# Altium footprint library KartaRfLibs.PcbLib: 51 footprints (part 3 of 4)
Each footprint in its own frame and in the unit in brackets; x right, y up, seen from the top. Pads: shape width x height; smd on the part's side, far side on the other; paste and mask are expansions set on the pad; w line width, h text height; cw(c..) or ccw(c..) is an arc to the next point about the centre after c.
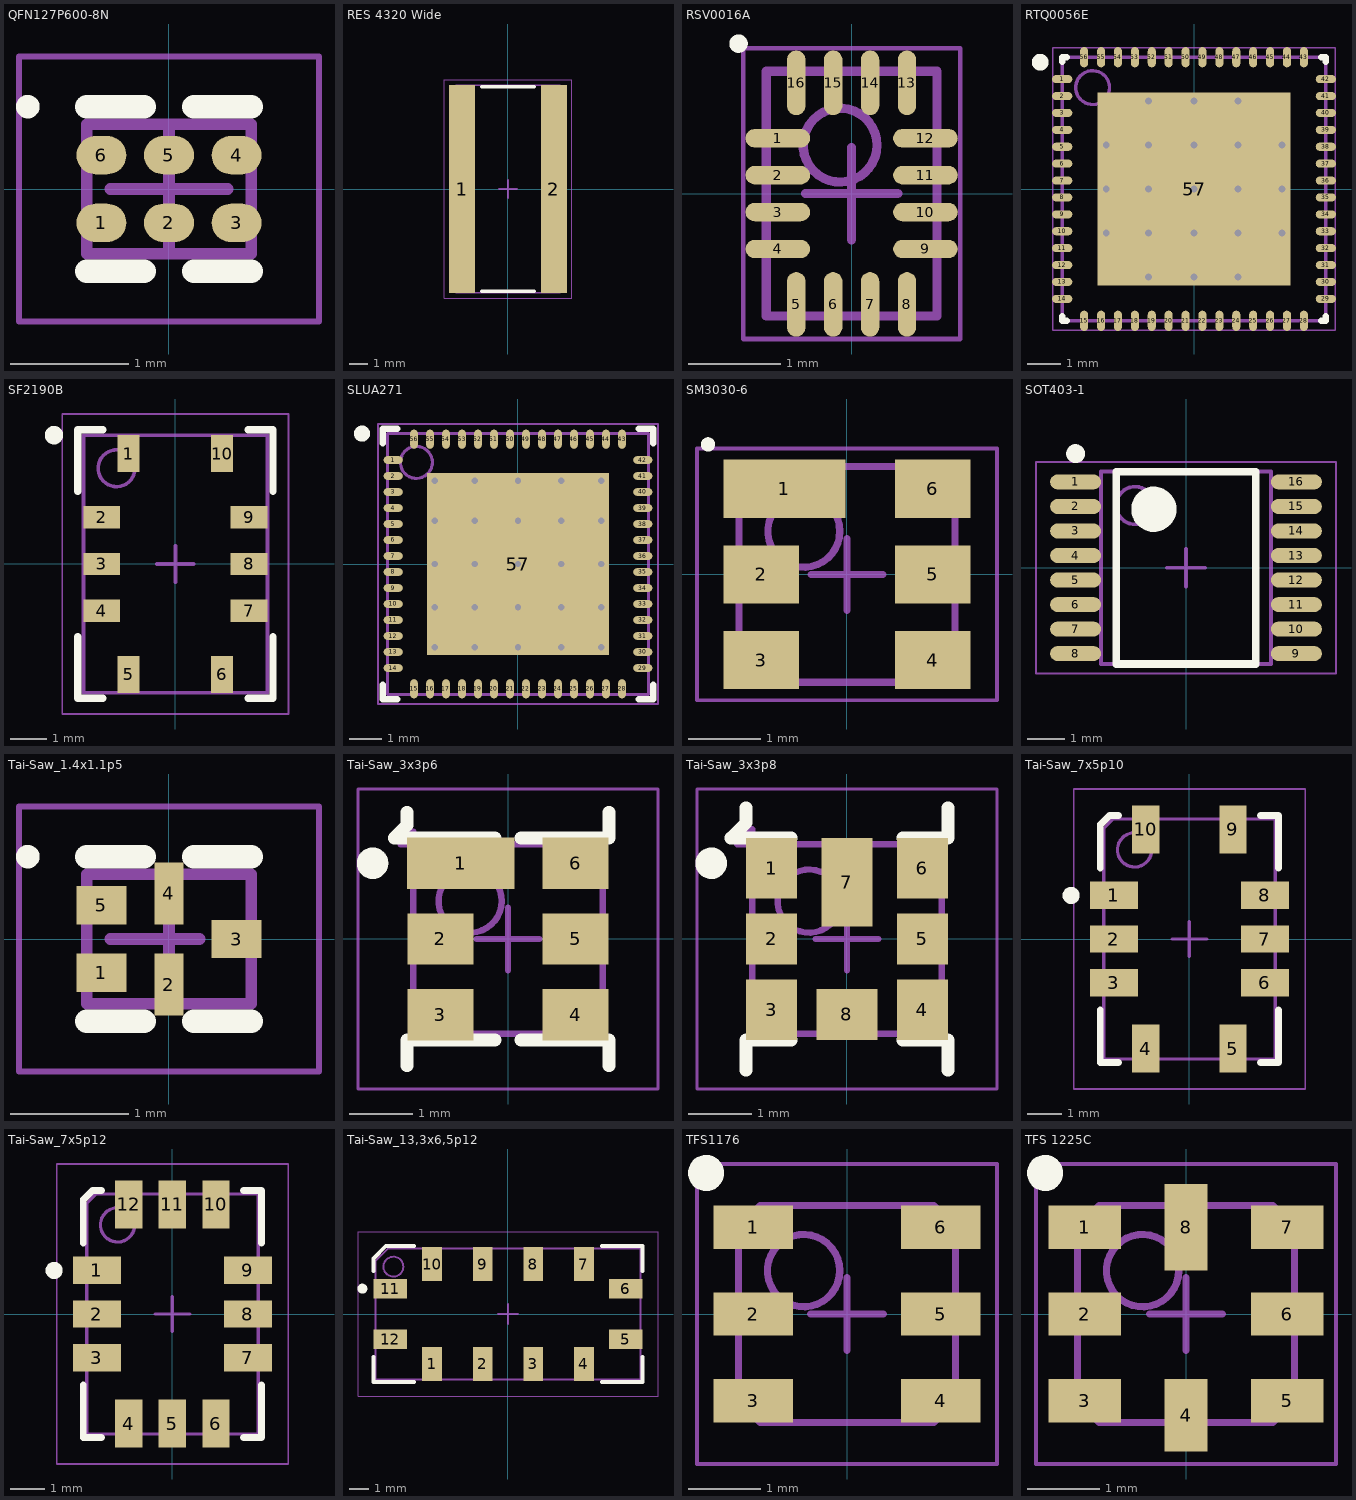
[diagram p2: the footprints below, top view; thin cyan lines are the x and y axes]

## QFN127P600-8N [mm]
height 0.7
pads (6):
  oval 0.425x0.325 smd: 1(-0.575,-0.288) 2(0,-0.288) 3(0.575,-0.288) 4(0.575,0.288) 5(0,0.288) 6(-0.575,0.288)
Top Overlay:
  circle w0.1: c-1.2,0.7 r0.05
  lines w0.2: -0.7,-0.7 -0.212,-0.7 ; -0.7,0.7 -0.212,0.7 ; 0.213,-0.7 0.7,-0.7 ; 0.213,0.7 0.7,0.7
Mechanical 13:
  lines w0.1: -0.7,-0.55 0.7,-0.55 0.7,0.55 -0.7,0.55 -0.7,-0.55
Mechanical 15:
  lines w0.05: -1.275,-1.125 1.275,-1.125 1.275,1.125 -1.275,1.125 -1.275,-1.125
  lines w0.1: -0.5,0 0.5,0 ; 0,-0.5 0,0.5
3D body: height 0.7, standoff 0.01, extent -0.7,-0.55 0.7,0.55

## RES 4320 Wide [mm] "FCSL110, Chip Resistor, 2-Leads, Body 5,60x11,20mm, IPC Medium Density"
height 0.6
pads (2):
  rect 1.4x11.25 smd: 1(-2.475,0) 2(2.475,0)
Top Overlay:
  lines w0.2: -1.4,-5.525 1.4,-5.525 ; -1.4,5.525 1.4,5.525
Mechanical 13:
  lines w0.1: -2.8,-5.6 -2.8,5.6 2.8,5.6 2.8,-5.6 -2.8,-5.6
Mechanical 15:
  lines w0.05: -3.45,-5.9 -3.45,5.9 3.45,5.9 3.45,-5.9 -3.45,-5.9
  lines w0.1: -0.5,0 0.5,0 ; 0,-0.5 0,0.5
3D body "RES 4320 Wide.step": height 0.6, standoff 0, extent -2.8,-5.6 2.8,5.6

## RSV0016A [mm] "TXB0304RSVR, UQFN, 16-Leads, Body 1,80x2,60mm, Pitch 0,40mm, IPC Medium Density"
height 0.55
pads (16):
  oval 0.7x0.2 smd: 1(-0.8,0.6) 2(-0.8,0.2) 3(-0.8,-0.2) 4(-0.8,-0.6) 9(0.8,-0.6) 10(0.8,-0.2) 11(0.8,0.2) 12(0.8,0.6)
  oval 0.2x0.7 smd: 5(-0.6,-1.2) 6(-0.2,-1.2) 7(0.2,-1.2) 8(0.6,-1.2) 13(0.6,1.2) 14(0.2,1.2) 15(-0.2,1.2) 16(-0.6,1.2)
Top Overlay:
  circle w0.1: c-1.225,1.625 r0.05
Mechanical 13:
  circle w0.1: c-0.125,0.525 r0.4
  lines w0.1: -0.925,-1.325 0.925,-1.325 0.925,1.325 -0.925,1.325 -0.925,-1.325
Mechanical 15:
  lines w0.05: -1.175,-1.575 1.175,-1.575 1.175,1.575 -1.175,1.575 -1.175,-1.575
  lines w0.1: -0.5,0 0.5,0 ; 0,-0.5 0,0.5
3D body "RSV0016A .step": height 0.55, standoff 0, extent -0.925,-1.325 0.925,1.325

## RTQ0056E [mm] "LMK04610, 56-Leads, Body 7,80x7,80mm, Pitch 0,50mm, Thermal Pad 5,70x5,70mm, IPC Medium Density"
height 1
pads (57):
  oval 0.6x0.24 smd: 1(-3.9,3.25) 2(-3.9,2.75) 3(-3.9,2.25) 4(-3.9,1.75) 5(-3.9,1.25) 6(-3.9,0.75) 7(-3.9,0.25) 8(-3.9,-0.25) 9(-3.9,-0.75) 10(-3.9,-1.25) 11(-3.9,-1.75) 12(-3.9,-2.25) 13(-3.9,-2.75) 14(-3.9,-3.25) 29(3.9,-3.25) 30(3.9,-2.75) 31(3.9,-2.25) 32(3.9,-1.75) 33(3.9,-1.25) 34(3.9,-0.75) 35(3.9,-0.25) 36(3.9,0.25) 37(3.9,0.75) 38(3.9,1.25) 39(3.9,1.75) 40(3.9,2.25) 41(3.9,2.75) 42(3.9,3.25)
  oval 0.24x0.6 smd: 15(-3.25,-3.9) 16(-2.75,-3.9) 17(-2.25,-3.9) 18(-1.75,-3.9) 19(-1.25,-3.9) 20(-0.75,-3.9) 21(-0.25,-3.9) 22(0.25,-3.9) 23(0.75,-3.9) 24(1.25,-3.9) 25(1.75,-3.9) 26(2.25,-3.9) 27(2.75,-3.9) 28(3.25,-3.9) 43(3.25,3.9) 44(2.75,3.9) 45(2.25,3.9) 46(1.75,3.9) 47(1.25,3.9) 48(0.75,3.9) 49(0.25,3.9) 50(-0.25,3.9) 51(-0.75,3.9) 52(-1.25,3.9) 53(-1.75,3.9) 54(-2.25,3.9) 55(-2.75,3.9) 56(-3.25,3.9)
  rect 5.7x5.7 smd: 57(0,0)
via 1.3,-2.6 diameter 0.5 hole 0.2
via 0,-2.6 diameter 0.5 hole 0.2
via -1.35,-2.6 diameter 0.5 hole 0.2
via 2.6,-1.3 diameter 0.5 hole 0.2
via 1.3,-1.3 diameter 0.5 hole 0.2
via 0,-1.3 diameter 0.5 hole 0.2
via -1.35,-1.3 diameter 0.5 hole 0.2
via -2.6,-1.3 diameter 0.5 hole 0.2
via 2.6,0 diameter 0.5 hole 0.2
via 1.3,0 diameter 0.5 hole 0.2
via 0,0 diameter 0.5 hole 0.2
via -1.35,0 diameter 0.5 hole 0.2
via -2.6,0 diameter 0.5 hole 0.2
via 2.6,1.3 diameter 0.5 hole 0.2
via 1.3,1.3 diameter 0.5 hole 0.2
via 0,1.3 diameter 0.5 hole 0.2
via -1.35,1.3 diameter 0.5 hole 0.2
via -2.6,1.3 diameter 0.5 hole 0.2
via 1.3,2.6 diameter 0.5 hole 0.2
via 0,2.6 diameter 0.5 hole 0.2
via -1.35,2.6 diameter 0.5 hole 0.2
Top Overlay:
  circle w0.25: c-4.55,3.75 r0.125
  lines w0.2: -3.9,-3.77 -3.9,-3.9 -3.77,-3.9 ; -3.9,3.77 -3.9,3.9 -3.77,3.9 ; 3.77,-3.9 3.9,-3.9 3.9,-3.77 ; 3.77,3.9 3.9,3.9 3.9,3.77
Mechanical 13:
  circle w0.1: c-3,3 r0.5
  lines w0.1: -3.9,-3.9 3.9,-3.9 3.9,3.9 -3.9,3.9 -3.9,-3.9
Mechanical 15:
  lines w0.05: -4.175,-4.175 4.175,-4.175 4.175,4.175 -4.175,4.175 -4.175,-4.175
  lines w0.1: -0.5,0 0.5,0 ; 0,-0.5 0,0.5
3D body "RTQ0056E.step": height 1, standoff 0, extent -3.9,-3.9 3.9,3.9

## SF2190B [mm] "SF2190B, 10-Leads, Body 5,00x7,00mm, Pitch 2,54mm/1,27mm, IPC Medium Density"
height 1.65
pads (10):
  rect 0.6x1 smd: 1(-1.27,3) 5(-1.27,-3) 6(1.27,-3) 10(1.27,3)
  rect 1x0.6 smd: 2(-2,1.27) 3(-2,0) 4(-2,-1.27) 7(2,-1.27) 8(2,0) 9(2,1.27)
Top Overlay:
  circle w0.25: c-3.3,3.5 r0.125
  lines w0.2: -2.65,-1.97 -2.65,-3.65 -1.97,-3.65 ; -2.65,1.97 -2.65,3.65 -1.97,3.65 ; 1.97,-3.65 2.65,-3.65 2.65,-1.97 ; 1.97,3.65 2.65,3.65 2.65,1.97
Mechanical 13:
  circle w0.1: c-1.6,2.6 r0.5
  lines w0.1: -2.5,-3.5 2.5,-3.5 2.5,3.5 -2.5,3.5 -2.5,-3.5
Mechanical 15:
  lines w0.05: -3.075,-4.075 3.075,-4.075 3.075,4.075 -3.075,4.075 -3.075,-4.075
  lines w0.1: -0.5,0 0.5,0 ; 0,-0.5 0,0.5
3D body "SF2190B.step": height 1.65, standoff 0, extent -2.52,-3.52 2.52,3.52

## SLUA271 [mm] "SLUA271, VQFN, 56-Leads, Body 8,00x8,00mm, Pitch 0,50mm, Thermal Pad 5,70x5,70mm, IPC High Density"
height 1
pads (57):
  oval 0.6x0.24 smd: 1(-3.9,3.25) 2(-3.9,2.75) 3(-3.9,2.25) 4(-3.9,1.75) 5(-3.9,1.25) 6(-3.9,0.75) 7(-3.9,0.25) 8(-3.9,-0.25) 9(-3.9,-0.75) 10(-3.9,-1.25) 11(-3.9,-1.75) 12(-3.9,-2.25) 13(-3.9,-2.75) 14(-3.9,-3.25) 29(3.9,-3.25) 30(3.9,-2.75) 31(3.9,-2.25) 32(3.9,-1.75) 33(3.9,-1.25) 34(3.9,-0.75) 35(3.9,-0.25) 36(3.9,0.25) 37(3.9,0.75) 38(3.9,1.25) 39(3.9,1.75) 40(3.9,2.25) 41(3.9,2.75) 42(3.9,3.25)
  oval 0.24x0.6 smd: 15(-3.25,-3.9) 16(-2.75,-3.9) 17(-2.25,-3.9) 18(-1.75,-3.9) 19(-1.25,-3.9) 20(-0.75,-3.9) 21(-0.25,-3.9) 22(0.25,-3.9) 23(0.75,-3.9) 24(1.25,-3.9) 25(1.75,-3.9) 26(2.25,-3.9) 27(2.75,-3.9) 28(3.25,-3.9) 43(3.25,3.9) 44(2.75,3.9) 45(2.25,3.9) 46(1.75,3.9) 47(1.25,3.9) 48(0.75,3.9) 49(0.25,3.9) 50(-0.25,3.9) 51(-0.75,3.9) 52(-1.25,3.9) 53(-1.75,3.9) 54(-2.25,3.9) 55(-2.75,3.9) 56(-3.25,3.9)
  rect 5.7x5.7 smd: 57(0,0)
via 2.6,-2.6 diameter 0.5 hole 0.2
via 1.35,-2.6 diameter 0.5 hole 0.2
via 0,-2.6 diameter 0.5 hole 0.2
via -1.35,-2.6 diameter 0.5 hole 0.2
via -2.6,-2.6 diameter 0.5 hole 0.2
via 2.6,-1.35 diameter 0.5 hole 0.2
via 1.35,-1.35 diameter 0.5 hole 0.2
via 0,-1.35 diameter 0.5 hole 0.2
via -1.35,-1.35 diameter 0.5 hole 0.2
via -2.6,-1.35 diameter 0.5 hole 0.2
via 2.6,0 diameter 0.5 hole 0.2
via 1.35,0 diameter 0.5 hole 0.2
via 0,0 diameter 0.5 hole 0.2
via -1.35,0 diameter 0.5 hole 0.2
via -2.6,0 diameter 0.5 hole 0.2
via 2.6,1.35 diameter 0.5 hole 0.2
via 1.35,1.35 diameter 0.5 hole 0.2
via 0,1.35 diameter 0.5 hole 0.2
via -1.35,1.35 diameter 0.5 hole 0.2
via -2.6,1.35 diameter 0.5 hole 0.2
via 2.6,2.6 diameter 0.5 hole 0.2
via 1.35,2.6 diameter 0.5 hole 0.2
via 0,2.6 diameter 0.5 hole 0.2
via -1.35,2.6 diameter 0.5 hole 0.2
via -2.6,2.6 diameter 0.5 hole 0.2
Top Overlay:
  circle w0.25: c-4.875,4.075 r0.125
  lines w0.2: -4.225,-3.77 -4.225,-4.225 -3.77,-4.225 ; -4.225,3.77 -4.225,4.225 -3.77,4.225 ; 3.77,-4.225 4.225,-4.225 4.225,-3.77 ; 3.77,4.225 4.225,4.225 4.225,3.77
Mechanical 13:
  circle w0.1: c-3.175,3.175 r0.5
  lines w0.1: -4.075,-4.075 4.075,-4.075 4.075,4.075 -4.075,4.075 -4.075,-4.075
Mechanical 15:
  lines w0.05: -4.375,-4.375 4.375,-4.375 4.375,4.375 -4.375,4.375 -4.375,-4.375
  lines w0.1: -0.5,0 0.5,0 ; 0,-0.5 0,0.5
3D body "SLUA271.step": height 1, standoff 0, extent -4.095,-4.095 4.095,4.095

## SM3030-6 [mm] "SM3030-6, SAW Filter, 6-Leads, Body 3,00x3,00mm, Pitch 1,19mm, IPC Medium Density"
height 1.25
pads (6):
  rect 1.7x0.81 smd: 1(-0.87,1.19)
  rect 1.05x0.81 smd: 2(-1.195,0) 3(-1.195,-1.19) 4(1.195,-1.19) 5(1.195,0) 6(1.195,1.19)
Top Overlay:
  circle w0.1: c-1.932,1.807 r0.05
Mechanical 13:
  circle w0.1: c-0.6,0.6 r0.5
  lines w0.1: -1.5,-1.5 1.5,-1.5 1.5,1.5 -1.5,1.5 -1.5,-1.5
Mechanical 15:
  lines w0.05: -2.085,-1.75 2.085,-1.75 2.085,1.75 -2.085,1.75 -2.085,-1.75
  lines w0.1: -0.5,0 0.5,0 ; 0,-0.5 0,0.5
3D body "SM3030-6.step": height 1.25, standoff 0.1, extent -1.5,-1.5 1.5,1.5

## SOT403-1 [mm] "SC18IS602B, TSSOP16, 16-Leads, Body 5,00x4,40mm, Pitch 0,65mm, IPC Medium Density"
height 1.1
pads (16):
  oval 1.35x0.4 smd: 1(-2.925,2.275) 2(-2.925,1.625) 3(-2.925,0.975) 4(-2.925,0.325) 5(-2.925,-0.325) 6(-2.925,-0.975) 7(-2.925,-1.625) 8(-2.925,-2.275) 9(2.925,-2.275) 10(2.925,-1.625) 11(2.925,-0.975) 12(2.925,-0.325) 13(2.925,0.325) 14(2.925,0.975) 15(2.925,1.625) 16(2.925,2.275)
Top Overlay:
  circle w0.6: c-0.85,1.55 r0.3
  circle w0.25: c-2.925,3.025 r0.125
  lines w0.2: -1.85,-2.55 1.85,-2.55 1.85,2.55 -1.85,2.55 -1.85,-2.55
Mechanical 13:
  circle w0.1: c-1.35,1.65 r0.5
  lines w0.1: -2.25,-2.55 2.25,-2.55 2.25,2.55 -2.25,2.55 -2.25,-2.55
Mechanical 15:
  lines w0.05: -3.975,-2.8 3.975,-2.8 3.975,2.8 -3.975,2.8 -3.975,-2.8
  lines w0.1: -0.5,0 0.5,0 ; 0,-0.5 0,0.5
3D body "SOT403-1.step": height 1.1, standoff 0, extent -3.3,-2.55 3.3,2.55

## Tai-Saw_1.4x1.1p5 [mm] "TA2298A, 6-Leads, Body 1,40x1,10mm, Pitch 0,57mm/0,50mm, IPC Medium Density"
height 0.7
pads (5):
  rect 0.425x0.325 smd: 1(-0.575,-0.288) 3(0.575,0) 5(-0.575,0.288)
  rect 0.25x0.525 smd: 2(0,-0.387) 4(0,0.387)
Top Overlay:
  circle w0.1: c-1.2,0.7 r0.05
  lines w0.2: -0.7,-0.7 -0.212,-0.7 ; -0.7,0.7 -0.212,0.7 ; 0.213,-0.7 0.7,-0.7 ; 0.213,0.7 0.7,0.7
Mechanical 13:
  lines w0.1: -0.7,-0.55 -0.7,0.55 0.7,0.55 0.7,-0.55 -0.7,-0.55
Mechanical 15:
  lines w0.05: -1.275,-1.125 -1.275,1.125 1.275,1.125 1.275,-1.125 -1.275,-1.125
  lines w0.1: -0.5,0 0.26,0 ; 0,-0.5 0,0.5
3D body "Tai-Saw_1.4x1.1p5.step": height 0.7, standoff 0, extent -0.7,-0.56 0.7,0.56

## Tai-Saw_3x3p6 [mm] "TA1251B, 6-Pins, Body 3,00x3,00mmx1,40mm, Pitch 1,20mm, IPC Medium Density"
height 1.4
pads (6):
  rect 1.7x0.81 smd: 1(-0.75,1.2)
  rect 1.05x0.81 smd: 2(-1.07,0) 3(-1.07,-1.2) 4(1.07,-1.2) 5(1.07,0) 6(1.07,1.2)
Top Overlay:
  circle w0.25: c-2.145,1.2 r0.125
  lines w0.2: -1.6,-2.005 -1.6,-1.6 -0.205,-1.6 ; -1.6,2.005 -1.6,1.802 -1.803,1.6 -0.205,1.6 ; 0.205,-1.6 1.6,-1.6 1.6,-2.005 ; 0.205,1.6 1.6,1.6 1.6,2.005
Mechanical 13:
  circle w0.1: c-0.6,0.6 r0.5
  lines w0.1: -1.703,1.5 1.5,1.5 1.5,-1.5 -1.5,-1.5 -1.5,1.702 -1.703,1.5
Mechanical 15:
  lines w0.05: -2.375,-2.375 -2.375,2.375 2.375,2.375 2.375,-2.375 -2.375,-2.375
  lines w0.1: -0.5,0 0.5,0 ; 0,-0.5 0,0.5
3D body "Tai-Saw_3x3p6.step": height 1.4, standoff 0, extent -1.5,-1.5 1.5,1.5

## Tai-Saw_3x3p8 [mm] "TA0726A, 8-Pins, Body 3,00x3,00mmx1,40mm, Pitch 1,20mm, IPC Medium Density"
height 1.4
pads (8):
  rect 0.81x0.96 smd: 1(-1.195,1.12) 3(-1.195,-1.12) 4(1.195,-1.12) 6(1.195,1.12)
  rect 0.81x0.81 smd: 2(-1.195,0) 5(1.195,0)
  rect 0.81x1.4 smd: 7(0,0.9)
  rect 0.96x0.81 smd: 8(0,-1.195)
Top Overlay:
  circle w0.25: c-2.15,1.2 r0.125
  lines w0.2: -1.6,-2.08 -1.6,-1.6 -0.88,-1.6 ; -1.6,2.08 -1.6,1.84 -1.84,1.6 -0.88,1.6 ; 0.88,-1.6 1.6,-1.6 1.6,-2.08 ; 0.88,1.6 1.6,1.6 1.6,2.08
Mechanical 13:
  circle w0.1: c-0.6,0.6 r0.5
  lines w0.1: -1.74,1.5 -1.5,1.74 -1.5,-1.5 1.5,-1.5 1.5,1.5 -1.74,1.5
Mechanical 15:
  lines w0.05: -2.375,-2.375 2.375,-2.375 2.375,2.375 -2.375,2.375 -2.375,-2.375
  lines w0.1: -0.5,0 0.5,0 ; 0,-0.5 0,0.5
3D body "Tai-Saw_3x3.step": height 1.4, standoff 0, extent -1.5,-1.605 1.5,1.5

## Tai-Saw_7x5p10 [mm] "TA0409A, 10-Pins, Body 5,00x7,00mmx1,70mm, Pitch 1,27mm, IPC Medium Density"
height 1.7
pads (10):
  rect 1.4x0.8 smd: 1(-2.2,1.27) 2(-2.2,0) 3(-2.2,-1.27) 6(2.2,-1.27) 7(2.2,0) 8(2.2,1.27)
  rect 0.8x1.4 smd: 4(-1.27,-3.2) 5(1.27,-3.2) 9(1.27,3.2) 10(-1.27,3.2)
Top Overlay:
  circle w0.25: c-3.45,1.27 r0.125
  lines w0.2: -2.6,-2.07 -2.6,-3.6 -2.07,-3.6 ; -2.6,2.07 -2.6,3.335 -2.335,3.6 -2.07,3.6 ; 2.07,-3.6 2.6,-3.6 2.6,-2.07 ; 2.07,3.6 2.6,3.6 2.6,2.07
Mechanical 13:
  circle w0.1: c-1.6,2.6 r0.5
  lines w0.1: -2.5,-3.5 -2.5,3.235 -2.235,3.5 2.5,3.5 2.5,-3.5 -2.5,-3.5
Mechanical 15:
  lines w0.05: -3.375,-4.375 -3.375,4.375 3.375,4.375 3.375,-4.375 -3.375,-4.375
  lines w0.1: -0.5,0 0.5,0 ; 0,-0.5 0,0.5
3D body "Tai-Saw_7x5.step": height 1.7, standoff 0, extent -2.5,-3.5 2.5,3.5

## Tai-Saw_7x5p12 [mm] "TA0409A, 12-Pins, Body 5,00x7,00mmx1,70mm, Pitch 1,27mm, IPC Medium Density"
height 1.7
pads (12):
  rect 1.4x0.8 smd: 1(-2.2,1.27) 2(-2.2,0) 3(-2.2,-1.27) 7(2.2,-1.27) 8(2.2,0) 9(2.2,1.27)
  rect 0.8x1.4 smd: 4(-1.27,-3.2) 5(0,-3.2) 6(1.27,-3.2) 10(1.27,3.2) 11(0,3.2) 12(-1.27,3.2)
Top Overlay:
  circle w0.25: c-3.45,1.27 r0.125
  lines w0.2: -2.6,-2.07 -2.6,-3.6 -2.07,-3.6 ; -2.6,2.07 -2.6,3.335 -2.335,3.6 -2.07,3.6 ; 2.07,-3.6 2.6,-3.6 2.6,-2.07 ; 2.07,3.6 2.6,3.6 2.6,2.07
Mechanical 13:
  circle w0.1: c-1.6,2.6 r0.5
  lines w0.1: -2.5,-3.5 2.5,-3.5 2.5,3.5 -2.235,3.5 -2.5,3.235 -2.5,-3.5
Mechanical 15:
  lines w0.05: -3.375,-4.375 3.375,-4.375 3.375,4.375 -3.375,4.375 -3.375,-4.375
  lines w0.1: -0.5,0 0.5,0 ; 0,-0.5 0,0.5
3D body "Tai-Saw_7x5.step": height 1.7, standoff 0, extent -2.5,-3.5 2.5,3.5

## Tai-Saw_13,3x6,5p12 [mm] "TB0467A, 12-Pins, Body 13,30x6,5mmx1,40mm, Pitch 2,54mm, IPC Medium Density"
height 1.4
pads (12):
  rect 0.99x1.7 smd: 1(-3.81,-2.5) 2(-1.27,-2.5) 3(1.27,-2.5) 4(3.81,-2.5) 7(3.81,2.5) 8(1.27,2.5) 9(-1.27,2.5) 10(-3.81,2.5)
  rect 1.7x0.99 smd: 5(5.905,-1.27) 6(5.905,1.27) 11(-5.905,1.27) 12(-5.905,-1.27)
Top Overlay:
  circle w0.25: c-7.305,1.27 r0.125
  lines w0.2: -6.75,-2.165 -6.75,-3.4 -4.705,-3.4 ; -6.75,2.165 -6.75,2.782 -6.132,3.4 -4.705,3.4 ; 4.705,-3.4 6.75,-3.4 6.75,-2.165 ; 4.705,3.4 6.75,3.4 6.75,2.165
Mechanical 13:
  circle w0.1: c-5.75,2.375 r0.5
  lines w0.1: -6.65,-3.275 6.65,-3.275 6.65,3.275 -6.032,3.275 -6.65,2.658 -6.65,-3.275
Mechanical 15:
  lines w0.05: -7.525,-4.125 7.525,-4.125 7.525,4.125 -7.525,4.125 -7.525,-4.125
  lines w0.1: -0.5,0 0.5,0 ; 0,-0.5 0,0.5

## TFS1176 [mm] "TFS 1225C, QFN, 8-Leads, Body 3,00x3,00mm, Pitch 1,20mm, IPC Medium Density"
height 1.1
pads (6):
  rect 1.1x0.6 smd: 1(-1.3,1.2) 2(-1.3,0) 3(-1.3,-1.2) 4(1.3,-1.2) 5(1.3,0) 6(1.3,1.2)
Top Overlay:
  circle w0.25: c-1.95,1.95 r0.125
Mechanical 13:
  circle w0.1: c-0.6,0.6 r0.5
  lines w0.1: -1.5,-1.2 -1.2,-1.5 1.2,-1.5 1.5,-1.2 1.5,1.2 1.2,1.5 -1.2,1.5 -1.5,1.2 -1.5,-1.2
Mechanical 15:
  lines w0.05: -2.075,-2.075 -2.075,2.075 2.075,2.075 2.075,-2.075 -2.075,-2.075
  lines w0.1: -0.5,0 0.5,0 ; 0,-0.5 0,0.5
3D body "TFS 1225C.step": height 1.1, standoff 0, extent -1.52,-1.52 1.52,1.52

## TFS 1225C [mm] "TFS 1225C, QFN, 8-Leads, Body 3,00x3,00mm, Pitch 1,20mm, IPC Medium Density"
height 1.1
pads (8):
  rect 1x0.6 smd: 1(-1.4,1.2) 2(-1.4,0) 3(-1.4,-1.2) 5(1.4,-1.2) 6(1.4,0) 7(1.4,1.2)
  rect 0.6x1 smd: 4(0,-1.4)
  rect 0.6x1.2 smd: 8(0,1.2)
Top Overlay:
  circle w0.25: c-1.95,1.95 r0.125
Mechanical 13:
  circle w0.1: c-0.6,0.6 r0.5
  lines w0.1: -1.5,-1.2 -1.2,-1.5 1.2,-1.5 1.5,-1.2 1.5,1.2 1.2,1.5 -1.2,1.5 -1.5,1.2 -1.5,-1.2
Mechanical 15:
  lines w0.05: -2.075,-2.075 -2.075,2.075 2.075,2.075 2.075,-2.075 -2.075,-2.075
  lines w0.1: -0.5,0 0.5,0 ; 0,-0.5 0,0.5
3D body "TFS 1225C.step": height 1.1, standoff 0, extent -1.52,-1.52 1.52,1.52